# Altium footprint library CAPPRD500W60D1000H1750.PcbLib: 1 footprints
Each footprint in its own frame and in the unit in brackets; x right, y up, seen from the top. Pads: shape width x height; smd on the part's side, far side on the other; paste and mask are expansions set on the pad; w line width, h text height; cw(c..) or ccw(c..) is an arc to the next point about the centre after c.
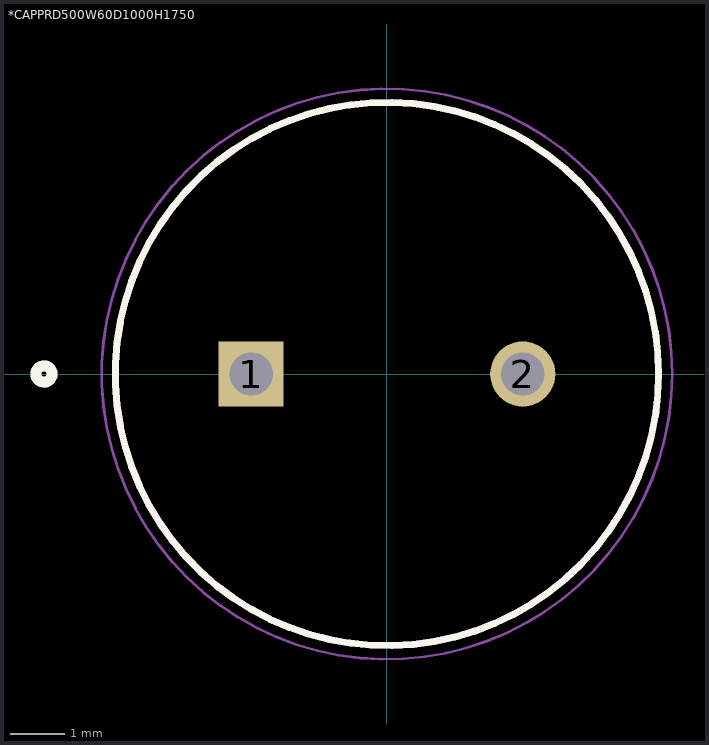
[diagram p0: the footprint, top view; thin cyan lines are the x and y axes]

## *CAPPRD500W60D1000H1750 [mm]
pads (2):
  rect 1.2x1.2 hole 0.8: 1(-2.5,0)
  round 1.2 hole 0.8: 2(2.5,0)
Top Overlay:
  circle w0.2: c-6.312,0 r0.15
  circle w0.2: c-6.312,0 r0.15
  circle w0.127: c0,0 r5
Mechanical 13:
  circle w0.2: c-6.312,0 r0.15
  circle w0.127: c0,0 r5
  circle w0.2: c-6.312,0 r0.15
  circle w0.127: c0,0 r5
Mechanical 15:
  circle w0.05: c0,0 r5.25